# Altium schematic symbol library Ic%.SchLib: 452 symbols (part 9 of 12)
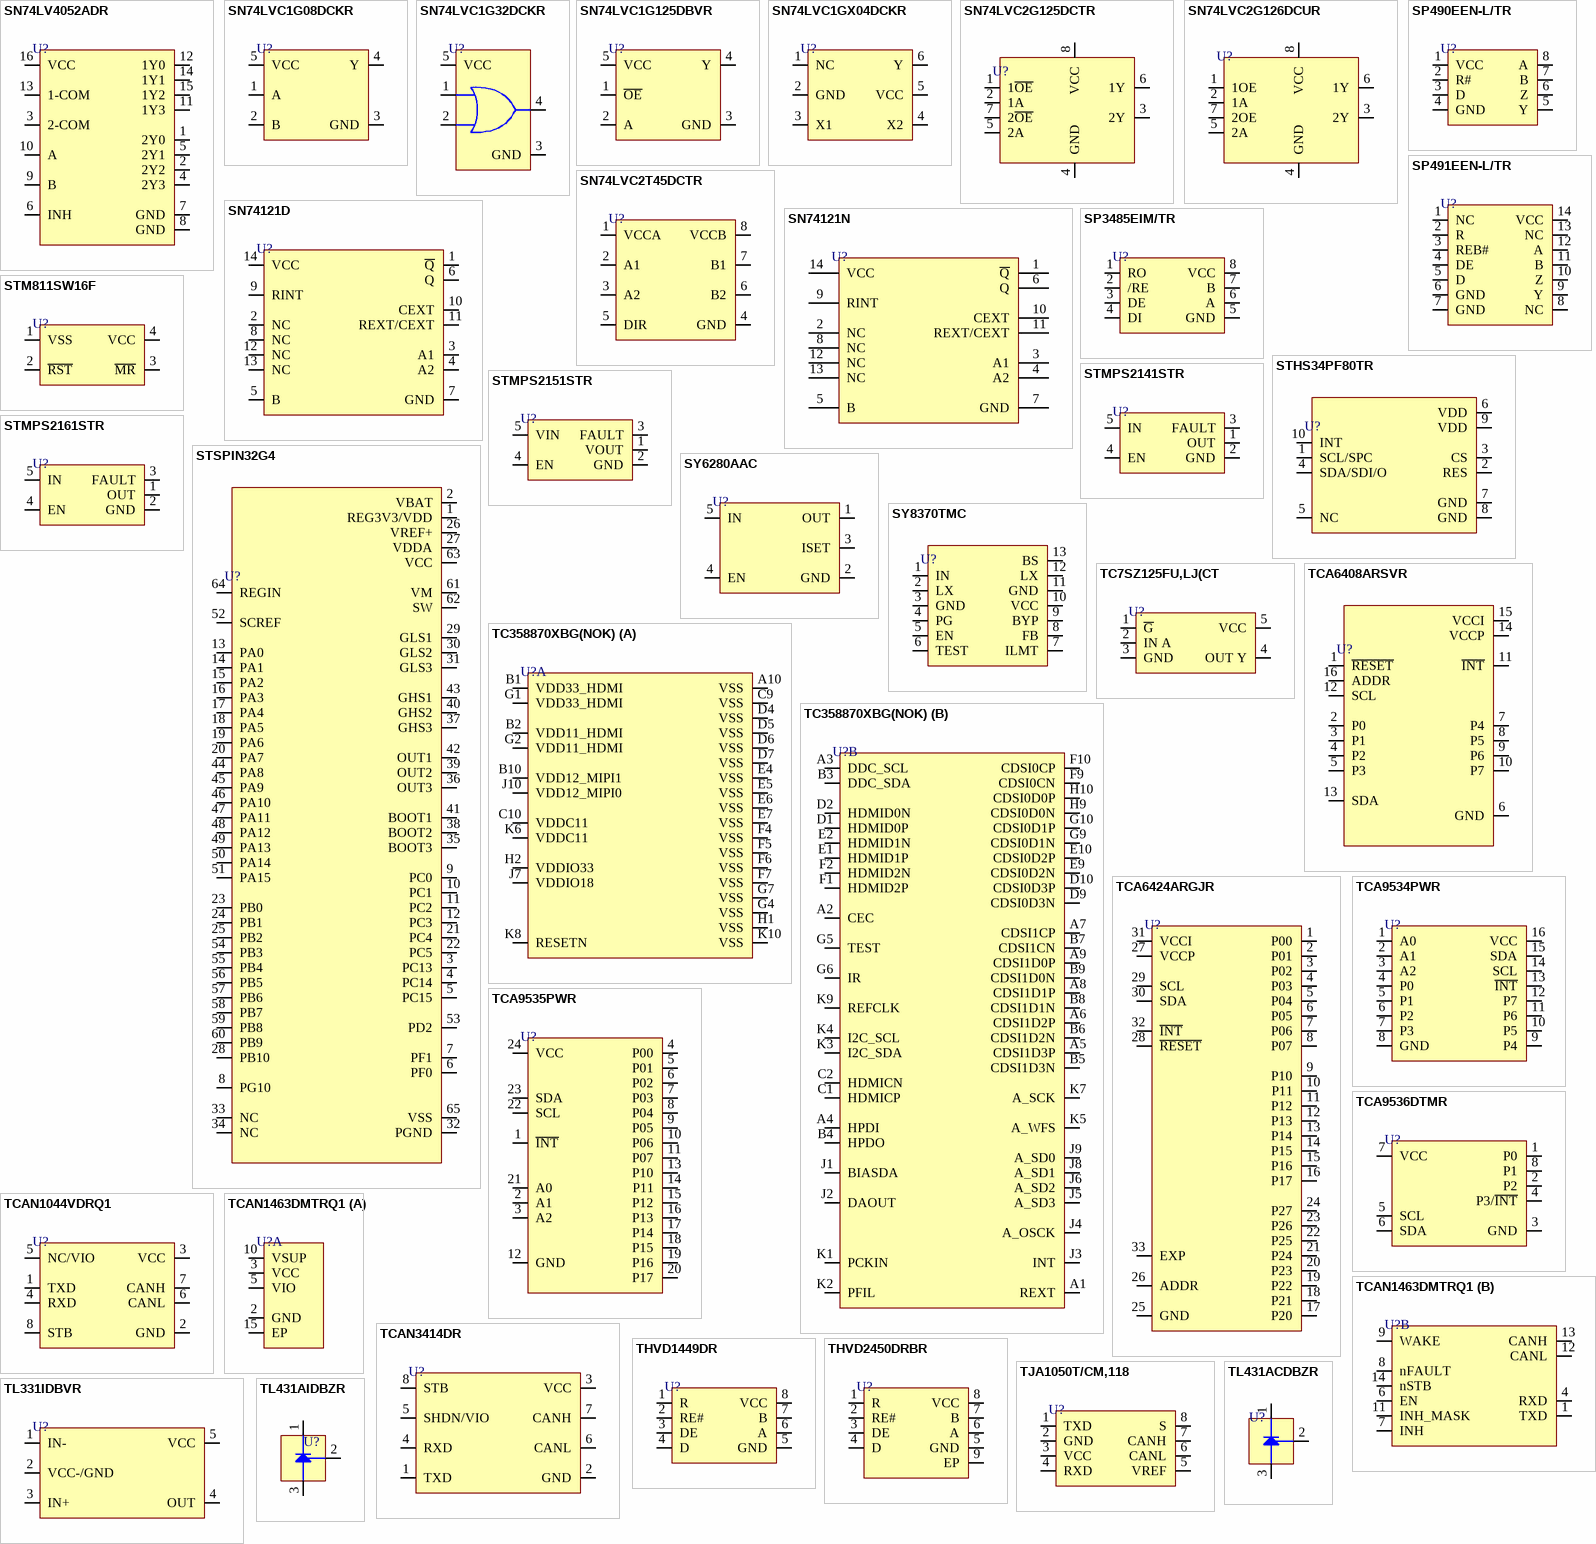
[diagram p31: symbols SN74LV4052ADR to TL431AIDBZR]

## SN74LVC1G32DCKR
designator U?
IC GATE OR 1CH 2-INP SC70-5; Manufacturer: Texas Instruments; Manufacturer Part Number: SN74LVC1G32DCKR; Output Current: 32mA; Propagation Delay: 4ns; Number of Circuits: 1; Number of Inputs: 2; Min Supply Voltage: 1.65V; Max Supply Voltage: 5.5V; Logic Function: OR GATE; Quiescent Current: 10uA; High Level Output Current: -32mA; Turn-On Delay Time: 4.5ns; Number of Channels: 1NUMBER; Supplier: Mouser; LCSC Part Number: C7840; RoHS: Yes; Item Type: IC; Stock: 85906; Pricing: 1=0.1, 10=0.058, 50=0.058, 100=0.042, 1000=0.039, 10000=0.033 (USD); Mounting Technology: Surface Mount; Case/Package: SC; Pins: 5; Weight: 8.8E-05oz; Min Operating Temperature: -40°C; Max Operating Temperature: 125°C; Packaging: Tape and Reel; Number of Gates: 1; Number of Bits: 1; Package Quantity: 1; Number of Elements: 1; Number of Outputs: 1; Low Level Output Current: 32mA; Number of Input Lines: 2; Number of Output Lines: 1; Series: 74LVC; Technology: CMOS; Max Output current: 32mA; Termination: SMD/SMT; Min Supply Voltage (DC): 1.65V; Nominal Supply Current: 10uA; Thickness: 900um; Radiation Hardening: No; Reach SVHC Compliant: No; Lead Free: Lead Free; RoHS Compliant: Yes; ComponentLink1URL: https://datasheet.ciiva.com/6124/1768050-6124560.pdf?src-supplier=Farnell; ComponentLink1Description: https://datasheet.ciiva.com/6124/1768050-6124560.pdf?src-supplier=Farnell; ComponentLink2URL: https://datasheet.ciiva.com/1864/sn74lvc1g32-1864192.pdf?src-supplier=Digikey; ComponentLink2Description: https://datasheet.ciiva.com/1864/sn74lvc1g32-1864192.pdf?src-supplier=Digikey; ComponentLink3URL: https://datasheet.ciiva.com/27049/756781-27049784.pdf?src-supplier=Jameco; ComponentLink3Description: https://datasheet.ciiva.com/27049/756781-27049784.pdf?src-supplier=Jameco; ComponentLink4URL: https://datasheet.ciiva.com/15090/getdatasheetpartid-127914-15090759.pdf?src-supplier=Verical; ComponentLink4Description: https://datasheet.ciiva.com/15090/getdatasheetpartid-127914-15090759.pdf?src-supplier=Verical; ComponentLink5URL: https://datasheet.ciiva.com/7783/1768050-7783469.pdf?src-supplier=Element14; ComponentLink5Description: https://datasheet.ciiva.com/7783/1768050-7783469.pdf?src-supplier=Element14; ComponentLink6URL: https://datasheet.ciiva.com/7783/1768050-7783470.pdf?src-supplier=Element14; ComponentLink6Description: https://datasheet.ciiva.com/7783/1768050-7783470.pdf?src-supplier=Element14; ComponentLink7URL: https://datasheet.ciiva.com/1864/sn74lvc1g32-1864191.pdf?src-supplier=Digikey; ComponentLink7Description: https://datasheet.ciiva.com/1864/sn74lvc1g32-1864191.pdf?src-supplier=Digikey; ComponentLink8URL: https://datasheet.ciiva.com/1864/sn74lvc1g32-1864193.pdf?src-supplier=Digikey; ComponentLink8Description: https://datasheet.ciiva.com/1864/sn74lvc1g32-1864193.pdf?src-supplier=Digikey; ComponentLink9URL: https://datasheet.ciiva.com/14290/sn74lvc1g32-14290781.pdf?src-supplier=Avnet; ComponentLink9Description: https://datasheet.ciiva.com/14290/sn74lvc1g32-14290781.pdf?src-supplier=Avnet
footprint SC70-5
pins: 1 A, 2 B, 3 GND, 4 Y, 5 VCC

## SN74LVC1G125DBVR
designator U?
IC BUFF NON-INVERT 5.5V SOT23-5; Manufacturer: Texas Instruments; Manufacturer Part Number: SN74LVC1G125DBVR; Item Type: Buffers, Drivers and Transceivers; Number of Elements: 1; Logic Function: Buffer,Inverting; High Level Output Current: 32mA; Polarity: Non-Inverting; Output Type: 3-STATE; Min Supply Voltage: 1.65V; Propagation Delay: 4ns; Quiescent Current: 10uA; Supplier 1: Mouser; RoHS: Yes; Stock 1: 237997; Pricing 1: 1=0.36, 10=0.243, 50=0.243, 100=0.102, 1000=0.07, 10000=0.037 (USD); Mount: Surface Mount; Case/Package: SOT-23-5; Weight: 0.001446oz; Min Operating Temperature: -40°C; Max Operating Temperature: 125°C; Packaging: Tape and Reel; Package Quantity: 3000; Number of Bits per Element: 1; Low Level Output Current: 32mA; Number of Gates: 1; Number of Bits: 1; Series: 74LVC; Max Supply Voltage: 5.5V; Number of Channels: 1; Technology: CMOS; Number of Input Lines: 1; Number of Output Lines: 1; Number of Circuits: 1; Max Supply Current: 10uA; Length: 2.9mm; Width: 1.6mm; Height: 1.15mm; Lead Free: Lead Free; RoHS Compliant: Yes; Supplier Part Number 1: 595-SN74LVC1G125DBVR
footprint SOT-23-5
pins: 1 ~{OE}, 2 A, 3 GND, 4 Y, 5 VCC

## SN74LVC1GX04DCKR
designator U?
IC CRYSTAL OSC DRIVER SC70-6; Manufacturer: Texas Instruments; Manufacturer Part Number: SN74LVC1GX04DCKR; Max Supply Voltage: 5.5V; Min Supply Voltage: 1.65V; Number of Bits: 1; Operating Supply Current: 10uA; Propagation Delay: 5ns; Supplier: Mouser; Supplier Part Number: 595-SN74LVC1GX04DCKR; RoHS: Yes; Item Type: IC; Stock: 6262; Pricing: 1=0.78, 10=0.664, 50=0.664, 100=0.526, 1000=0.385, 10000=0.334 (USD); Mounting Technology: Surface Mount; Case/Package: SC; Pins: 6; Weight: 8.8E-05oz; Min Operating Temperature: -40°C; Max Operating Temperature: 125°C; Packaging: Tape and Reel; Package Quantity: 3000; Series: 74LVC; Length: 2mm; Depth: 1.25mm; Radiation Hardening: No; Lead Free: Lead Free; RoHS Compliant: Yes; ComponentLink1URL: https://datasheet.ciiva.com/15116/getdatasheetpartid-252002-15116145.pdf?src-supplier=Verical; ComponentLink1Description: https://datasheet.ciiva.com/15116/getdatasheetpartid-252002-15116145.pdf?src-supplier=Verical; ComponentLink2URL: https://datasheet.ciiva.com/1897/sn74lvc1gx04-1897126.pdf?src-supplier=Digikey; ComponentLink2Description: https://datasheet.ciiva.com/1897/sn74lvc1gx04-1897126.pdf?src-supplier=Digikey; ComponentLink3URL: https://datasheet.ciiva.com/1897/sn74lvc1gx04-1897125.pdf?src-supplier=Digikey; ComponentLink3Description: https://datasheet.ciiva.com/1897/sn74lvc1gx04-1897125.pdf?src-supplier=Digikey; ComponentLink4URL: https://datasheet.ciiva.com/1897/sn74lvc1gx04-1897127.pdf?src-supplier=Digikey; ComponentLink4Description: https://datasheet.ciiva.com/1897/sn74lvc1gx04-1897127.pdf?src-supplier=Digikey; ComponentLink5URL: https://datasheet.ciiva.com/3179/sn74lvc1gx04-3179083.pdf?src-supplier=Avnet; ComponentLink5Description: https://datasheet.ciiva.com/3179/sn74lvc1gx04-3179083.pdf?src-supplier=Avnet; ComponentLink6URL: https://datasheet.ciiva.com/3177/sn74lvc1gx04-3177448.pdf?src-supplier=Avnet; ComponentLink6Description: https://datasheet.ciiva.com/3177/sn74lvc1gx04-3177448.pdf?src-supplier=Avnet; LCSC Part Number: C2649416
footprint SC-70-6
pins: 1 NC, 2 GND, 3 X1, 4 X2, 5 VCC, 6 Y

## SN74LVC2G125DCTR
designator U?
IC BUFFER NON-INVERT 5.5V SM8; Manufacturer: Texas Instruments; Manufacturer Part Number: SN74LVC2G125DCTR; Nominal Supply Current: 10uA; Number of Circuits: 1NUMBER; Supplier 1: Mouser; RoHS: Yes; Item Type: IC; Stock 1: 14743; Pricing 1: 1=0.52, 10=0.427, 50=0.427, 100=0.316, 1000=0.241, 10000=0.19 (USD); Thickness: 1.29mm; ComponentLink1URL: https://datasheet.ciiva.com/7744/1781747-7744021.pdf?src-supplier=Element14; ComponentLink1Description: https://datasheet.ciiva.com/7744/1781747-7744021.pdf?src-supplier=Element14; ComponentLink2URL: https://datasheet.ciiva.com/7744/1781747-7744022.pdf?src-supplier=Element14; ComponentLink2Description: https://datasheet.ciiva.com/7744/1781747-7744022.pdf?src-supplier=Element14; Supplier Part Number 1: 595-SN74LVC2G125DCTR; LCSC Part Number: C206035
footprint SM8
pins: 1 1~{OE}, 2 1A, 3 2Y, 4 GND, 5 2A, 6 1Y, 7 2~{OE}, 8 VCC

## SN74LVC2G126DCUR
designator U?
Low-Noise, 8-Channel, 24-Bit Analog-to-Digital Converter for Biopotential Measurements 64-TQFP -40 to 85; Manufacturer: Texas Instruments; Manufacturer Part Number: SN74LVC2G126DCUR; Item Type: IC; Power Consumption: 41mW; Supplier: Mouser; Supplier Part Number: 595-SN74LVC2G126DCUR; RoHS: Yes; Category: Buffers, Drivers and Transceivers; Stock: 11510; Pricing: 1=0.51, 10=0.406, 50=0.406, 100=0.3, 1000=0.19, 10000=0.151 (USD); ComponentLink1URL: https://datasheet.ciiva.com/15094/getdatasheetpartid-92138-15094658.pdf?src-supplier=Verical; ComponentLink1Description: https://datasheet.ciiva.com/15094/getdatasheetpartid-92138-15094658.pdf?src-supplier=Verical; ComponentLink2URL: https://datasheet.ciiva.com/1833/sn74lvc2g126-1833920.pdf?src-supplier=Digi-Key; ComponentLink2Description: https://datasheet.ciiva.com/1833/sn74lvc2g126-1833920.pdf?src-supplier=Digi-Key; ComponentLink3URL: https://datasheet.ciiva.com/1833/sn74lvc2g126-1833919.pdf?src-supplier=Digi-Key; ComponentLink3Description: https://datasheet.ciiva.com/1833/sn74lvc2g126-1833919.pdf?src-supplier=Digi-Key; ComponentLink4URL: https://datasheet.ciiva.com/1833/sn74lvc2g126-1833921.pdf?src-supplier=Digi-Key; ComponentLink4Description: https://datasheet.ciiva.com/1833/sn74lvc2g126-1833921.pdf?src-supplier=Digi-Key; ComponentLink5URL: https://datasheet.ciiva.com/7744/1633768-7744173.pdf?src-supplier=Element14; ComponentLink5Description: https://datasheet.ciiva.com/7744/1633768-7744173.pdf?src-supplier=Element14; ComponentLink6URL: https://datasheet.ciiva.com/46386/1882504-46386027.pdf?src-supplier=Element14; ComponentLink6Description: https://datasheet.ciiva.com/46386/1882504-46386027.pdf?src-supplier=Element14; ComponentLink7URL: https://datasheet.ciiva.com/46439/1847403-46439626.pdf?src-supplier=Element14; ComponentLink7Description: https://datasheet.ciiva.com/46439/1847403-46439626.pdf?src-supplier=Element14; LCSC Part Number: C2652104; Length: 10mm; Width: 10mm; Height: 1.2mm; Thickness: 1mm; Lead Free: 5697LeadFree; ComponentLink8URL: https://datasheet.ciiva.com/13063/ads1299-224171-13063283.pdf?src-supplier=Mouser; ComponentLink8Description: https://datasheet.ciiva.com/13063/ads1299-224171-13063283.pdf?src-supplier=Mouser; ComponentLink9URL: https://datasheet.ciiva.com/26913/getdatasheetpartid-563195-26913237.pdf?src-supplier=Verical; ComponentLink9Description: https://datasheet.ciiva.com/26913/getdatasheetpartid-563195-26913237.pdf?src-supplier=Verical; ComponentLink10URL: https://datasheet.ciiva.com/6668/ads1299-6668469.pdf?src-supplier=Digikey; ComponentLink10Description: https://datasheet.ciiva.com/6668/ads1299-6668469.pdf?src-supplier=Digikey
footprint VSSOP-8 (0.5mm Pitch) (3.1x2.1)
pins: 1 1OE, 2 1A, 3 2Y, 4 GND, 5 2A, 6 1Y, 7 2OE, 8 VCC

## SN74LVC2T45DCTR
designator U?
IC TRANSLATOR BIDIRECTIONAL SM8; Manufacturer: Texas Instruments; Manufacturer Part Number: SN74LVC2T45DCTR; Supplier: Mouser; LCSC Part Number: C22672; RoHS: Yes; Item Type: IC; Stock: 182025; Pricing: 1=0.83, 10=0.709, 50=0.709, 100=0.567, 1000=0.413, 10000=0.334 (USD); ComponentLink1URL: https://datasheet.ciiva.com/15086/getdatasheetpartid-190128-15086325.pdf?src-supplier=Verical; ComponentLink1Description: https://datasheet.ciiva.com/15086/getdatasheetpartid-190128-15086325.pdf?src-supplier=Verical; ComponentLink2URL: https://datasheet.ciiva.com/1899/sn74lvc2t45-1899281.pdf?src-supplier=Digikey; ComponentLink2Description: https://datasheet.ciiva.com/1899/sn74lvc2t45-1899281.pdf?src-supplier=Digikey; ComponentLink3URL: https://datasheet.ciiva.com/34301/1046748-34301921.pdf?src-supplier=Jameco; ComponentLink3Description: https://datasheet.ciiva.com/34301/1046748-34301921.pdf?src-supplier=Jameco; ComponentLink4URL: https://datasheet.ciiva.com/1628/1862500-1628670.pdf?src-supplier=Newark; ComponentLink4Description: https://datasheet.ciiva.com/1628/1862500-1628670.pdf?src-supplier=Newark; ComponentLink5URL: https://datasheet.ciiva.com/46395/1882347-46395882.pdf?src-supplier=Element14; ComponentLink5Description: https://datasheet.ciiva.com/46395/1882347-46395882.pdf?src-supplier=Element14; ComponentLink6URL: https://datasheet.ciiva.com/22653/sn74lvc2t45-22653414.pdf?src-supplier=Farnell; ComponentLink6Description: https://datasheet.ciiva.com/22653/sn74lvc2t45-22653414.pdf?src-supplier=Farnell; ComponentLink7URL: https://datasheet.ciiva.com/14300/sn74lvc2t45-14300710.pdf?src-supplier=Avnet; ComponentLink7Description: https://datasheet.ciiva.com/14300/sn74lvc2t45-14300710.pdf?src-supplier=Avnet; ComponentLink8URL: https://datasheet.ciiva.com/14300/sn74lvc2t45-14300711.pdf?src-supplier=Avnet; ComponentLink8Description: https://datasheet.ciiva.com/14300/sn74lvc2t45-14300711.pdf?src-supplier=Avnet; ComponentLink9URL: https://datasheet.ciiva.com/1899/sn74lvc2t45-1899282.pdf?src-supplier=Digikey; ComponentLink9Description: https://datasheet.ciiva.com/1899/sn74lvc2t45-1899282.pdf?src-supplier=Digikey; ComponentLink10URL: https://datasheet.ciiva.com/1899/sn74lvc2t45-1899283.pdf?src-supplier=Digikey; ComponentLink10Description: https://datasheet.ciiva.com/1899/sn74lvc2t45-1899283.pdf?src-supplier=Digikey; ComponentLink11URL: https://datasheet.ciiva.com/1508/1863620-1508814.pdf?src-supplier=Element14; ComponentLink11Description: https://datasheet.ciiva.com/1508/1863620-1508814.pdf?src-supplier=Element14
footprint MSOP-8
pins: 1 VCCA, 2 A1, 3 A2, 4 GND, 5 DIR, 6 B2, 7 B1, 8 VCCB

## SN74121D
designator U?
45ns 4.75V~5.25V SOIC-14 Monostable Multivibrators ROHS; Manufacturer: Taxes Instrument; Manufacturer Part Number: SN74121D; Item Type: IC; Package: SOIC-14; LCSC Part Number: C1522774; ComponentLink1Description: LCSC; ComponentLink1URL: https://www.lcsc.com/product-detail/Monostable-Multivibrators_Texas-Instruments-SN74121D_C1522774.html
footprint SOIC-14
pins: 1 ~{Q}, 2 NC, 3 A1, 4 A2, 5 B, 6 Q, 7 GND, 8 NC, 9 RINT, 10 CEXT, 11 REXT/CEXT, 12 NC, 13 NC, 14 VCC

## SN74121N
designator U?
45ns 4.75V~5.25V DIP-14 Monostable Multivibrators ROHS; Manufacturer: Texas Instruments; Manufacturer Part Number: SN74121N; Item Type: IC; Package: DIP-14; LCSC Part Number: C354141; ComponentLink1Description: LCSC; ComponentLink1URL: https://www.lcsc.com/product-detail/Monostable-Multivibrators_Texas-Instruments-SN74121N_C354141.html
footprint DIP-14
pins: 1 ~{Q}, 2 NC, 3 A1, 4 A2, 5 B, 6 Q, 7 GND, 8 NC, 9 RINT, 10 CEXT, 11 REXT/CEXT, 12 NC, 13 NC, 14 VCC

## SP490EEN-L/TR
designator U?
IC TRANSCEIVER FULL 1/1 8SOIC; Manufacturer: MaxLinear; Manufacturer Part Number: SP490EEN-L/TR; Supplier: Digikey; LCSC Part Number: C19128; RoHS: Yes; Item Type: IC; Stock: 3412; Pricing: 1=1.82, 10=1.288, 25=1.1548, 100=1.0088, 250=0.93916, 500=0.89714, 1000=0.86255 (USD); ComponentLink1URL: https://www.maxlinear.com/document?id=747&src-supplier=Digikey; ComponentLink1Description: https://www.maxlinear.com/document?id=747&src-supplier=Digikey; ComponentLink2URL: https://datasheet.octopart.com/SP490EEN-L-TR-MaxLinear-datasheet-104600443.pdf?src-supplier=LKR; ComponentLink2Description: https://datasheet.octopart.com/SP490EEN-L-TR-MaxLinear-datasheet-104600443.pdf?src-supplier=LKR
footprint SOIC-8(0.154", 3.90mm Width)
pins: 1 VCC, 2 R#, 3 D, 4 GND, 5 Y, 6 Z, 7 B, 8 A

## SP491EEN-L/TR
designator U?
IC TRANSCEIVER FULL 1/1 14SOIC; Manufacturer: MaxLinear; Manufacturer Part Number: SP491EEN-L/TR; Supplier: Digikey; LCSC Part Number: C32476; RoHS: Yes; Item Type: IC; Stock: 20733; Pricing: 1=1.82, 10=1.288, 25=1.1548, 100=1.0088, 250=0.93916, 500=0.89714, 1000=0.86255 (USD); ComponentLink1URL: https://www.maxlinear.com/document?id=747&src-supplier=Digikey; ComponentLink1Description: https://www.maxlinear.com/document?id=747&src-supplier=Digikey; ComponentLink2URL: https://datasheet.octopart.com/SP491EEN-L-TR-MaxLinear-datasheet-104600443.pdf?src-supplier=LKR; ComponentLink2Description: https://datasheet.octopart.com/SP491EEN-L-TR-MaxLinear-datasheet-104600443.pdf?src-supplier=LKR
footprint SOIC-14
pins: 1 NC, 2 R, 3 REB#, 4 DE, 5 D, 6 GND, 7 GND, 8 NC, 9 Y, 10 Z, 11 B, 12 A, 13 NC, 14 VCC

## SP3485EIM/TR
designator U?
SOP-8 RS-485/RS-422 ICs ROHS; Manufacturer: HGSEMI; Manufacturer Part Number: SP3485EIM/TR; Item Type: IC; Package: SOP-8; LCSC Part Number: C519086; ComponentLink1Description: LCSC; ComponentLink1URL: https://www.lcsc.com/product-detail/RS-485-RS-422-ICs_HGSEMI-SP3485EIM-TR_C519086.html
footprint SOP-8
pins: 1 RO, 2 /RE, 3 DE, 4 DI, 5 GND, 6 A, 7 B, 8 VCC

## STHS34PF80TR
designator U?
SENSOR OPT 5000-20000NM 10OLGA; Manufacturer: STMicroelectronics; Manufacturer Part Number: STHS34PF80TR; Item Type: IC; Supplier: Arrow Electronics; Supplier Part Number: STHS34PF80TR; RoHS: No; Stock: 49500; Pricing: 4500=3.223 (USD)
footprint 10-OLGA (3.2x4.2)
pins: 1 SCL/SPC, 2 RES, 3 CS, 4 SDA/SDI/O, 5 NC, 6 VDD, 7 GND, 8 GND, 9 VDD, 10 INT

## STM811SW16F
designator U?
IC SUPERVISOR 1 CHANNEL SOT143-4; Manufacturer: STMicroelectronics; Manufacturer Part Number: STM811SW16F; Supplier: Mouser; Supplier Part Number: 511-STM811SW16F; RoHS: Yes; Item Type: IC; Stock: 20552; Pricing: 1=0.59, 10=0.546, 50=0.528, 100=0.468, 1000=0.37, 10000=0.335 (USD); ComponentLink1URL: https://datasheet.ciiva.com/15105/getdatasheetpartid-93222-15105852.pdf?src-supplier=Verical; ComponentLink1Description: https://datasheet.ciiva.com/15105/getdatasheetpartid-93222-15105852.pdf?src-supplier=Verical; ComponentLink2URL: https://datasheet.ciiva.com/1970/cd00003591-1970356.pdf?src-supplier=Digikey; ComponentLink2Description: https://datasheet.ciiva.com/1970/cd00003591-1970356.pdf?src-supplier=Digikey; ComponentLink3URL: https://datasheet.ciiva.com/1970/cd00003591-1970357.pdf?src-supplier=Digikey; ComponentLink3Description: https://datasheet.ciiva.com/1970/cd00003591-1970357.pdf?src-supplier=Digikey; ComponentLink4URL: https://datasheet.ciiva.com/1970/cd00003591-1970358.pdf?src-supplier=Digikey; ComponentLink4Description: https://datasheet.ciiva.com/1970/cd00003591-1970358.pdf?src-supplier=Digikey; ComponentLink5URL: https://datasheet.ciiva.com/22710/1690194-22710283.pdf?src-supplier=Element14; ComponentLink5Description: https://datasheet.ciiva.com/22710/1690194-22710283.pdf?src-supplier=Element14; LCSC Part Number: C124715
footprint SOT-143-4_
pins: 1 VSS, 2 ~{RST}, 3 ~{MR}, 4 VCC

## STMPS2141STR
designator U?
IC PWR SWITCH N-CHAN 1:1 SOT23-5; Manufacturer: STMicroelectronics; Manufacturer Part Number: STMPS2141STR; Drain to Source Resistance: 90mR; Max Supply Voltage: 5.5V; Min Supply Voltage: 2.7V; Nominal Supply Voltage: 5V; Number of Channels: 1NUMBER; Value: 120mR; Supplier: Future Electronics; LCSC Part Number: C54624; RoHS: Yes; Item Type: IC; Stock: 102000; Pricing: 3000=0.167, 9000=0.162, 12000=0.161, 30000=0.157, 45000=0.153 (USD); Output Voltage: 5V; ComponentLink1URL: https://datasheet.ciiva.com/15108/getdatasheetpartid-160072-15108990.pdf?src-supplier=Verical; ComponentLink1Description: https://datasheet.ciiva.com/15108/getdatasheetpartid-160072-15108990.pdf?src-supplier=Verical; ComponentLink2URL: https://datasheet.ciiva.com/4923/cd00167470-4923447.pdf?src-supplier=Mouser; ComponentLink2Description: https://datasheet.ciiva.com/4923/cd00167470-4923447.pdf?src-supplier=Mouser; ComponentLink3URL: https://datasheet.ciiva.com/1962/cd00167470-1962472.pdf?src-supplier=Digikey; ComponentLink3Description: https://datasheet.ciiva.com/1962/cd00167470-1962472.pdf?src-supplier=Digikey; ComponentLink4URL: https://datasheet.ciiva.com/1962/cd00167470-1962473.pdf?src-supplier=Digikey; ComponentLink4Description: https://datasheet.ciiva.com/1962/cd00167470-1962473.pdf?src-supplier=Digikey; ComponentLink5URL: https://datasheet.ciiva.com/1962/cd00167470-1962474.pdf?src-supplier=Digikey; ComponentLink5Description: https://datasheet.ciiva.com/1962/cd00167470-1962474.pdf?src-supplier=Digikey; ComponentLink6URL: https://datasheet.ciiva.com/16491/cd00167470-16491245.pdf?src-supplier=Future+Electronics; ComponentLink6Description: https://datasheet.ciiva.com/16491/cd00167470-16491245.pdf?src-supplier=Future+Electronics
footprint SOT-23-5
pins: 1 OUT, 2 GND, 3 FAULT, 4 EN, 5 IN

## STMPS2151STR
designator U?
IC PWR SWITCH N-CHAN 1:1 SOT23-5; Manufacturer: STMicroelectronics; Manufacturer Part Number: STMPS2151STR; Current: 500mA; Drain to Source Resistance: 90mΩ; Fault Protection: Over Temperature, Reverse Current; Interface: On/Off; Max Supply Voltage: 5.5V; Max Junction Temperature (Tj): 125°C; Max Power Dissipation: 33.8mW; Max Supply Current: 40µA; Min Input Voltage: 2.7V; Nominal Supply Voltage: 5V; Nominal Supply Current: 12µA; Number of Channels: 1; Output Configuration: High Side; Power Dissipation: 32.5mW; Value: 90mΩ; Turn-Off Delay Time: 10ms; Turn-On Delay Time: 5ms; Supplier: Arrow Electronics; LCSC Part Number: C135998; RoHS: Compliant; Item Type: IC; Stock: 6000; Pricing: 3000=0.4293, 6000=0.391 (USD); Ambient Temperature Range High: 85°C; Case/Package: SOT-23; China RoHS: Compliant; Current Rating: 500mA; Height: 1.45mm; Height - Seated (Max): 1.45mm; Lead Free: Lead Free; Length: 2.9mm; Lifecycle Status: Production; Max Operating Temperature: 85°C; Max Output current: 500mA; Min Operating Temperature: -40°C; Min Supply Voltage: 2.7V; Mounting Technology: Surface Mount; Number of Circuits: 1; Number of Inputs: 1; Number of Outputs: 1; Pins: 5; Number of Terminals: 5; On-State Resistance: 90mΩ; Operating Supply Voltage: 5V; Output Current: 500mA; Output Voltage: 5V; Radiation Hardening: No; REACH SVHC: Yes; Schedule B: 8542390000; Terminal Pitch: 950µm; Voltage: 5.5V; Width: 1.625mm; ComponentLink1URL: https://datasheet.octopart.com:443/STMPS2151STR-STMicroelectronics-datasheet-15207125.pdf?src-supplier=ODG+(Origin+Data+Global); ComponentLink1Description: https://datasheet.octopart.com:443/STMPS2151STR-STMicroelectronics-datasheet-15207125.pdf?src-supplier=ODG+(Origin+Data+Global); ComponentLink2URL: https://datasheet.octopart.com:443/STMPS2151STR-STMicroelectronics-datasheet-8090930.pdf?src-supplier=Factory+Futures; ComponentLink2Description: https://datasheet.octopart.com:443/STMPS2151STR-STMicroelectronics-datasheet-8090930.pdf?src-supplier=Factory+Futures; ComponentLink3URL: https://datasheet.octopart.com:443/STMPS2151STR-STMicroelectronics-datasheet-12510524.pdf?src-supplier=Factory+Futures; ComponentLink3Description: https://datasheet.octopart.com:443/STMPS2151STR-STMicroelectronics-datasheet-12510524.pdf?src-supplier=Factory+Futures; ComponentLink4URL: https://datasheet.octopart.com:443/STMPS2151STR-STMicroelectronics-datasheet-502421.pdf?src-supplier=Future+Electronics; ComponentLink4Description: https://datasheet.octopart.com:443/STMPS2151STR-STMicroelectronics-datasheet-502421.pdf?src-supplier=Future+Electronics
footprint SOT-23-5
pins: 1 VOUT, 2 GND, 3 FAULT, 4 EN, 5 VIN

## STMPS2161STR
designator U?
IC PWR SWITCH N-CHAN 1:1 SOT23-5; Manufacturer: STMicroelectronics; Manufacturer Part Number: STMPS2161STR; Drain to Source Resistance: 90mR; Max Supply Voltage: 5.5V; Min Supply Voltage: 2.7V; Nominal Supply Voltage: 5V; Number of Channels: 1NUMBER; Supplier: Future Electronics; LCSC Part Number: C361034; RoHS: Yes; Item Type: IC; Stock: 3000; Pricing: 3000=0.42, 6000=0.41, 9000=0.405, 12000=0.405, 15000=0.395 (USD); Output Voltage: 5V; Height: 1.45mm; ComponentLink1URL: https://datasheet.ciiva.com/4923/cd00167470-116695-4923505.pdf?src-supplier=Mouser; ComponentLink1Description: https://datasheet.ciiva.com/4923/cd00167470-116695-4923505.pdf?src-supplier=Mouser; ComponentLink2URL: https://datasheet.ciiva.com/15108/getdatasheetpartid-66027-15108935.pdf?src-supplier=Verical; ComponentLink2Description: https://datasheet.ciiva.com/15108/getdatasheetpartid-66027-15108935.pdf?src-supplier=Verical; ComponentLink3URL: https://datasheet.ciiva.com/1962/cd00167470-1962487.pdf?src-supplier=Digikey; ComponentLink3Description: https://datasheet.ciiva.com/1962/cd00167470-1962487.pdf?src-supplier=Digikey; ComponentLink4URL: https://datasheet.ciiva.com/1962/cd00167470-1962488.pdf?src-supplier=Digikey; ComponentLink4Description: https://datasheet.ciiva.com/1962/cd00167470-1962488.pdf?src-supplier=Digikey; ComponentLink5URL: https://datasheet.ciiva.com/1962/cd00167470-1962489.pdf?src-supplier=Digikey; ComponentLink5Description: https://datasheet.ciiva.com/1962/cd00167470-1962489.pdf?src-supplier=Digikey; ComponentLink6URL: https://datasheet.ciiva.com/1512/1700527-1512630.pdf?src-supplier=Element14; ComponentLink6Description: https://datasheet.ciiva.com/1512/1700527-1512630.pdf?src-supplier=Element14; ComponentLink7URL: https://datasheet.ciiva.com/16491/cd00167470-16491224.pdf?src-supplier=Future+Electronics; ComponentLink7Description: https://datasheet.ciiva.com/16491/cd00167470-16491224.pdf?src-supplier=Future+Electronics; ComponentLink8URL: https://datasheet.ciiva.com/41457/001185713-da-01-en-ic-pwr-switch-stmps2161str-sot-23-5-stm-41457482.pdf?src-supplier=Conrad; ComponentLink8Description: https://datasheet.ciiva.com/41457/001185713-da-01-en-ic-pwr-switch-stmps2161str-sot-23-5-stm-41457482.pdf?src-supplier=Conrad
footprint SOT-23-5
pins: 1 OUT, 2 GND, 3 FAULT, 4 EN, 5 IN

## STSPIN32G4
designator U?
3-PHASE BRUSHLESS MOTOR CONTROLL; Manufacturer: STMicroelectronics; Manufacturer Part Number: STSPIN32G4; Item Type: IC; Supplier: Mouser; LCSC Part Number: C7434864; RoHS: Yes; Stock: 5173; Pricing: 1=7.19, 10=5.61, 50=4.81, 100=4.81, 1000=4.37, 10000=4.37 (USD)
footprint 64-VFQFPN 9X9
pins: 1 REG3V3/VDD, 2 VBAT, 3 PC13, 4 PC14, 5 PC15, 6 PF0, 7 PF1, 8 PG10, 9 PC0, 10 PC1, 11 PC2, 12 PC3, 13 PA0, 14 PA1, 15 PA2, 16 PA3, 17 PA4, 18 PA5, 19 PA6, 20 PA7, 21 PC4, 22 PC5, 23 PB0, 24 PB1, 25 PB2, 26 VREF+, 27 VDDA, 28 PB10, 29 GLS1, 30 GLS2, 31 GLS3, 32 PGND, 33 NC, 34 NC, 35 BOOT3, 36 OUT3, 37 GHS3, 38 BOOT2, 39 OUT2, 40 GHS2, 41 BOOT1, 42 OUT1, 43 GHS1, 44 PA8, 45 PA9, 46 PA10, 47 PA11, 48 PA12, 49 PA13, 50 PA14, 51 PA15, 52 SCREF, 53 PD2, 54 PB3, 55 PB4, 56 PB5, 57 PB6, 58 PB7, 59 PB8, 60 PB9, 61 VM, 62 SW, 63 VCC, 64 REGIN, 65 VSS

## SY6280AAC
designator U?
SOT-23-5 Power Distribution Switches ROHS; Manufacturer: Silergy; Manufacturer Part Number: SY6280AAC; Item Type: IC; Supplier: Avnet; Supplier Part Number: SY6280AAC; RoHS: No; Category: USB Interface ICs; Stock: 3000; LCSC Part Number: C55136
footprint SOT-23-5
pins: 1 OUT, 2 GND, 3 ISET, 4 EN, 5 IN

## SY8370TMC
designator U?
Step-down type Adjustable 1.2V 4V~24V 11A QFN-13(3x4) DC-DC Converters ROHS; Manufacturer: Silergy Corp; Manufacturer Part Number: SY8370TMC; Item Type: IC; Package: QFN-13(3x4); LCSC Part Number: C3029744; ComponentLink1Description: LCSC; ComponentLink1URL: https://www.lcsc.com/product-detail/DC-DC-Converters_Silergy-Corp-SY8370TMC_C3029744.html
footprint QFN-13(3x4)
pins: 1 IN, 2 LX, 3 GND, 4 PG, 5 EN, 6 TEST, 7 ILMT, 8 FB, 9 BYP, 10 VCC, 11 GND, 12 LX, 13 BS

## TC7SZ125FU,LJ(CT
designator U?
IC BUFFER NON-INVERT 5.5V USV; Manufacturer: Toshiba; Manufacturer Part Number: TC7SZ125FU,LJ(CT; Min Supply Voltage: 1.8V; Number of Elements: 1; Logic Function: Buffer,Inverting; High Level Output Current: 32mA; Operating Supply Current: 20uA; Max Power Dissipation: 200mW; Polarity: Non-Inverting; Output Type: 3-STATE; Supplier: Rs; Supplier Part Number: 8966769; RoHS: No; Category: Buffers, Drivers and Transceivers; Stock: 800; Pricing: 100=0.12, 300=0.097, 600=0.094, 1200=0.091, 3000=0.089 (GBP); Mounting Technology: Surface Mount; Case/Package: SSOP; Min Operating Temperature: -40°C; Max Operating Temperature: 85°C; Packaging: Tape and Reel; Package Quantity: 1; Max Supply Voltage: 5.5V; Series: TC7SZ; Number of Bits per Element: 1; Low Level Output Current: 32mA; RoHS Compliant: No; ComponentLink1URL: https://datasheet.ciiva.com/48465/tc7sz125fu-datasheet-en-20150723-48465175.pdf?src-supplier=Avnet; ComponentLink1Description: https://datasheet.ciiva.com/48465/tc7sz125fu-datasheet-en-20150723-48465175.pdf?src-supplier=Avnet; ComponentLink2URL: https://datasheet.ciiva.com/46637/dst-tc7sz125f-tde-en-7291-46637000.pdf?src-supplier=Digi-Key; ComponentLink2Description: https://datasheet.ciiva.com/46637/dst-tc7sz125f-tde-en-7291-46637000.pdf?src-supplier=Digi-Key; ComponentLink3URL: https://datasheet.ciiva.com/46637/dst-tc7sz125f-tde-en-7291-46637001.pdf?src-supplier=Digi-Key; ComponentLink3Description: https://datasheet.ciiva.com/46637/dst-tc7sz125f-tde-en-7291-46637001.pdf?src-supplier=Digi-Key; ComponentLink4URL: https://datasheet.ciiva.com/46636/dst-tc7sz125f-tde-en-7291-46636999.pdf?src-supplier=Digi-Key; ComponentLink4Description: https://datasheet.ciiva.com/46636/dst-tc7sz125f-tde-en-7291-46636999.pdf?src-supplier=Digi-Key
footprint SOT-323-5
pins: 1 ~{G}, 2 IN A, 3 GND, 4 OUT Y, 5 VCC

## TC358870XBG(NOK)
designator U?
Ultra HD to Display Serial Interface Converter 80-Pin VFBGA; Manufacturer: Toshiba; Manufaure Part Number: TC358870XBG(NOK); Item Type: IC; LCSC Part Number: C3008712; ComponentLink1Description: LCSC; Supplier: Mouser; Supplier Part Number: 757-TC358870XBG(NOK); Manufacturer Part Number: TC358870XBG(NOK); RoHS: Yes; Stock: 662; Pricing: 1=10.6, 10=9.75, 50=9.35, 100=8.24, 1000=7.32, 10000=6.71 (USD); Case/Package: VFBGA; Min Operating Temperature: -30°C; Max Operating Temperature: 70°C; ComponentLink2URL: http://toshiba.semicon-storage.com/info/docget.jsp?did=28743&prodName=TC358870XBG&src-supplier=Avnet; ComponentLink2Description: http://toshiba.semicon-storage.com/info/docget.jsp?did=28743&prodName=TC358870XBG&src-supplier=Avnet
footprint TC358870XBG
part A pins: A10 VSS, B1 VDD33_HDMI, B2 VDD11_HDMI, B10 VDD12_MIPI1, C9 VSS, C10 VDDC11, D4 VSS, D5 VSS, D6 VSS, D7 VSS, E4 VSS, E5 VSS, E6 VSS, E7 VSS, F4 VSS, F5 VSS, F6 VSS, F7 VSS, G1 VDD33_HDMI, G2 VDD11_HDMI, G4 VSS, G7 VSS, H1 VSS, H2 VDDIO33, J7 VDDIO18, J10 VDD12_MIPI0, K6 VDDC11, K8 RESETN, K10 VSS
part B pins: A1 REXT, A2 CEC, A3 DDC_SCL, A4 HPDI, A5 CDSI1D3P, A6 CDSI1D2P, A7 CDSI1CP, A8 CDSI1D1P, A9 CDSI1D0P, B3 DDC_SDA, B4 HPDO, B5 CDSI1D3N, B6 CDSI1D2N, B7 CDSI1CN, B8 CDSI1D1N, B9 CDSI1D0N, C1 HDMICP, C2 HDMICN, D1 HDMID0P, D2 HDMID0N, D9 CDSI0D3N, D10 CDSI0D3P, E1 HDMID1P, E2 HDMID1N, E9 CDSI0D2N, E10 CDSI0D2P, F1 HDMID2P, F2 HDMID2N, F9 CDSI0CN, F10 CDSI0CP, G5 TEST, G6 IR, G9 CDSI0D1N, G10 CDSI0D1P, H9 CDSI0D0N, H10 CDSI0D0P, J1 BIASDA, J2 DAOUT, J3 INT, J4 A_OSCK, J5 A_SD3, J6 A_SD2, J8 A_SD1, J9 A_SD0, K1 PCKIN, K2 PFIL, K3 I2C_SDA, K4 I2C_SCL, K5 A_WFS, K7 A_SCK, K9 REFCLK

## TCA6408ARSVR
designator U?
IC XPNDR 400KHZ I2C SMBUS 16UQFN; Manufacturer: Texas Instruments; Manufacturer Part Number: TCA6408ARSVR; Number of Outputs: 8; Max Supply Voltage: 5.5V; Min Supply Voltage: 1.65V; Output Type: PUSH-PULL; Supplier: Mouser; LCSC Part Number: C2649390; RoHS: Yes; Item Type: IC; Stock: 4894; Pricing: 1=0.65, 10=0.463, 50=0.414, 100=0.362, 1000=0.305, 10000=0.275 (USD); Case/Package: QFN; Pins: 16; Min Operating Temperature: -40°C; Max Operating Temperature: 85°C; Packaging: Tape and Reel; Package Quantity: 3000; Number of I/Os: 8; Frequency: 400kHz; Clock Frequency: 400kHz; Series: -; Length: 2.6mm; Width: 1.8mm; Height: 550um; Thickness: 500um; Radiation Hardening: No; Reach SVHC Compliant: No; Lead Free: Lead Free; RoHS Compliant: Yes; ComponentLink1URL: https://datasheet.ciiva.com/4826/scps192c-115421-4826631.pdf?src-supplier=Mouser; ComponentLink1Description: https://datasheet.ciiva.com/4826/scps192c-115421-4826631.pdf?src-supplier=Mouser; ComponentLink2URL: https://datasheet.ciiva.com/15134/getdatasheetpartid-186210-15134440.pdf?src-supplier=Verical; ComponentLink2Description: https://datasheet.ciiva.com/15134/getdatasheetpartid-186210-15134440.pdf?src-supplier=Verical; ComponentLink3URL: https://datasheet.ciiva.com/41460/001187859-da-01-en-ic-i-o-expander-tca6408arsvr-qfn-16-tid-41460599.pdf?src-supplier=Conrad; ComponentLink3Description: https://datasheet.ciiva.com/41460/001187859-da-01-en-ic-i-o-expander-tca6408arsvr-qfn-16-tid-41460599.pdf?src-supplier=Conrad; ComponentLink4URL: https://datasheet.ciiva.com/1780/tca6408a-1780880.pdf?src-supplier=Digikey; ComponentLink4Description: https://datasheet.ciiva.com/1780/tca6408a-1780880.pdf?src-supplier=Digikey; ComponentLink5URL: https://datasheet.ciiva.com/3149/tca6408a-3149514.pdf?src-supplier=Avnet; ComponentLink5Description: https://datasheet.ciiva.com/3149/tca6408a-3149514.pdf?src-supplier=Avnet
footprint 16-UQFN (2.6x1.8)
pins: 1 ~{RESET}, 2 P0, 3 P1, 4 P2, 5 P3, 6 GND, 7 P4, 8 P5, 9 P6, 10 P7, 11 ~{INT}, 12 SCL, 13 SDA, 14 VCCP, 15 VCCI, 16 ADDR

## TCA6424ARGJR
designator U?
IC XPNDR 400KHZ I2C SMBUS 32UQFN; Manufacturer: Texas Instruments; Manufacturer Part Number: TCA6424ARGJR; Min Supply Voltage: 1.65V; Max Supply Voltage: 5.5V; Output Current: 25mA; Number of Outputs: 24; Output Type: PUSH-PULL; Supplier: Mouser; Supplier Part Number: 595-TCA6424ARGJR; RoHS: Yes; Category: Interface ICs; Stock: 59506; Pricing: 1=2.13, 10=1.81, 50=1.81, 100=1.54, 1000=1.05, 10000=0.894 (USD); Case/Package: QFN; Pins: 32; Weight: 0.002116oz; Min Operating Temperature: -40°C; Max Operating Temperature: 85°C; Packaging: Tape and Reel; Number of I/Os: 24; Clock Frequency: 400kHz; Frequency: 400kHz; Series: -; Length: 5.15mm; Width: 5.15mm; Height: 0.6mm; Radiation Hardening: No; Reach SVHC Compliant: No; Lead Free: Lead Free; RoHS Compliant: Yes; ComponentLink1URL: https://datasheet.ciiva.com/1600/tca6424a-1600866.pdf?src-supplier=Newark; ComponentLink1Description: https://datasheet.ciiva.com/1600/tca6424a-1600866.pdf?src-supplier=Newark; ComponentLink2URL: https://datasheet.ciiva.com/1496/1535173-1496151.pdf?src-supplier=Element14; ComponentLink2Description: https://datasheet.ciiva.com/1496/1535173-1496151.pdf?src-supplier=Element14; ComponentLink3URL: https://datasheet.ciiva.com/22652/1699435-22652096.pdf?src-supplier=Element14; ComponentLink3Description: https://datasheet.ciiva.com/22652/1699435-22652096.pdf?src-supplier=Element14; ComponentLink4URL: https://datasheet.ciiva.com/1780/tca6424a-1780437.pdf?src-supplier=Digikey; ComponentLink4Description: https://datasheet.ciiva.com/1780/tca6424a-1780437.pdf?src-supplier=Digikey; ComponentLink5URL: https://datasheet.ciiva.com/4826/scps193b-101393-4826180.pdf?src-supplier=Mouser; ComponentLink5Description: https://datasheet.ciiva.com/4826/scps193b-101393-4826180.pdf?src-supplier=Mouser; ComponentLink6URL: https://datasheet.ciiva.com/15134/getdatasheetpartid-254651-15134577.pdf?src-supplier=Verical; ComponentLink6Description: https://datasheet.ciiva.com/15134/getdatasheetpartid-254651-15134577.pdf?src-supplier=Verical; ComponentLink7URL: https://datasheet.ciiva.com/1505/1535173-1505147.pdf?src-supplier=Farnell; ComponentLink7Description: https://datasheet.ciiva.com/1505/1535173-1505147.pdf?src-supplier=Farnell; ComponentLink8URL: https://datasheet.ciiva.com/1780/tca6424a-1780438.pdf?src-supplier=Digikey; ComponentLink8Description: https://datasheet.ciiva.com/1780/tca6424a-1780438.pdf?src-supplier=Digikey; ComponentLink9URL: https://datasheet.ciiva.com/1780/tca6424a-1780439.pdf?src-supplier=Digikey; ComponentLink9Description: https://datasheet.ciiva.com/1780/tca6424a-1780439.pdf?src-supplier=Digikey; ComponentLink10URL: https://datasheet.ciiva.com/14195/tca6424a-14195387.pdf?src-supplier=Avnet; ComponentLink10Description: https://datasheet.ciiva.com/14195/tca6424a-14195387.pdf?src-supplier=Avnet; ComponentLink11URL: https://datasheet.ciiva.com/41460/001187873-da-01-en-ic-i-o-expander-tca6424argjr-uqfn-32-tid-41460550.pdf?src-supplier=Conrad; ComponentLink11Description: https://datasheet.ciiva.com/41460/001187873-da-01-en-ic-i-o-expander-tca6424argjr-uqfn-32-tid-41460550.pdf?src-supplier=Conrad; LCSC Part Number: C80692; Item Type: IC
footprint 32-UQFN (5x5)
pins: 1 P00, 2 P01, 3 P02, 4 P03, 5 P04, 6 P05, 7 P06, 8 P07, 9 P10, 10 P11, 11 P12, 12 P13, 13 P14, 14 P15, 15 P16, 16 P17, 17 P20, 18 P21, 19 P22, 20 P23, 21 P24, 22 P25, 23 P26, 24 P27, 25 GND, 26 ADDR, 27 VCCP, 28 ~{RESET}, 29 SCL, 30 SDA, 31 VCCI, 32 ~{INT}, 33 EXP

## TCA9534PWR
designator U?
IC XPNDR 400KHZ I2C 16TSSOP; Manufacturer: Texas Instruments; Manufacturer Part Number: TCA9534PWR; Number of I/Os: 8; Output Type: PUSH-PULL; Max Supply Voltage: 5.5V; Min Supply Voltage: 1.65V; Supplier: Mouser; Supplier Part Number: 595-TCA9534PWR; RoHS: Yes; Category: Interface ICs; Stock: 11972; Pricing: 1=1.2, 10=0.788, 50=0.788, 100=0.654, 1000=0.606, 10000=0.564 (USD); Mounting Technology: Surface Mount; Case/Package: TSSOP; Pins: 16; Min Operating Temperature: -40°C; Max Operating Temperature: 85°C; Packaging: Cut Tape; Interface: I2C; Frequency: 400kHz; Number of Outputs: 8; Series: -; Number of Channels: 8; Length: 5mm; Width: 4.4mm; Height: 1.2mm; Thickness: 1mm; Lead Free: Lead Free; RoHS Compliant: Yes; ComponentLink1URL: https://datasheet.ciiva.com/48508/tca9534-48508117.pdf?src-supplier=Avnet; ComponentLink1Description: https://datasheet.ciiva.com/48508/tca9534-48508117.pdf?src-supplier=Avnet; LCSC Part Number: C783615; Item Type: IC
footprint TSSOP_16
pins: 1 A0, 2 A1, 3 A2, 4 P0, 5 P1, 6 P2, 7 P3, 8 GND, 9 P4, 10 P5, 11 P6, 12 P7, 13 ~{INT}, 14 SCL, 15 SDA, 16 VCC

## TCA9535PWR
designator U?
IC XPND 400KHZ I2C SMBUS 24TSSOP; Manufacturer: Texas Instruments; Manufacturer Part Number: TCA9535PWR; Supplier: Mouser; Supplier Part Number: 595-TCA9535PWR; RoHS: Yes; Category: Interface ICs; Stock: 12963; Pricing: 1=1.22, 10=0.799, 50=0.799, 100=0.663, 1000=0.615, 10000=0.557 (USD); Length: 7.8mm; Width: 4.4mm; Height: 1.2mm; Thickness: 1mm; Lead Free: 5697LeadFree; ComponentLink1URL: https://datasheet.ciiva.com/4826/scps201a-101401-4826418.pdf?src-supplier=Mouser; ComponentLink1Description: https://datasheet.ciiva.com/4826/scps201a-101401-4826418.pdf?src-supplier=Mouser; ComponentLink2URL: https://datasheet.ciiva.com/22652/scps201a-22652097.pdf?src-supplier=Element14; ComponentLink2Description: https://datasheet.ciiva.com/22652/scps201a-22652097.pdf?src-supplier=Element14; ComponentLink3URL: https://datasheet.ciiva.com/1780/tca9535-1780411.pdf?src-supplier=Digikey; ComponentLink3Description: https://datasheet.ciiva.com/1780/tca9535-1780411.pdf?src-supplier=Digikey; ComponentLink4URL: https://datasheet.ciiva.com/14195/tca9535-14195180.pdf?src-supplier=Avnet; ComponentLink4Description: https://datasheet.ciiva.com/14195/tca9535-14195180.pdf?src-supplier=Avnet; Package: TSSOP-24; LCSC Part Number: C130204; Item Type: IC
footprint 24-TSSOP
pins: 1 ~{INT}, 2 A1, 3 A2, 4 P00, 5 P01, 6 P02, 7 P03, 8 P04, 9 P05, 10 P06, 11 P07, 12 GND, 13 P10, 14 P11, 15 P12, 16 P13, 17 P14, 18 P15, 19 P16, 20 P17, 21 A0, 22 SCL, 23 SDA, 24 VCC

## TCA9536DTMR
designator U?
IC XPNDR 1MHZ I2C SMBUS 8X2SON; Manufacturer: Texas Instruments; Manufacturer Part Number: TCA9536DTMR; Supplier: Digikey; LCSC Part Number: C3190167; RoHS: No; Item Type: IC; Stock: 11208; Pricing: 1=1.47, 10=1.031, 25=0.9216, 100=0.8017, 250=0.7444, 500=0.70988, 1000=0.68143, 2500=0.65139 (USD)
footprint 8-X2SON (1.35x0.8)
pins: 1 P0, 2 P2, 3 GND, 4 P3/~{INT}, 5 SCL, 6 SDA, 7 VCC, 8 P1

## TCAN1044VDRQ1
designator U?
IC TRANSCEIVER 1/1 8SOIC; Manufacturer: Texas Instruments; Manufacturer Part Number: TCAN1044VDRQ1; Supplier: Mouser; Supplier Part Number: 595-TCAN1044VDRQ1; RoHS: Yes; Category: Interface ICs; Stock: 317; Pricing: 1=1.4, 10=1.19, 50=1.19, 100=0.912, 1000=0.636, 10000=0.554 (USD); ComponentLink1URL: http://www.ti.com/general/docs/suppproductinfo.tsp?distId=10&amp;gotoUrl=http%3A%2F%2Fwww.ti.com%2Flit%2Fgpn%2Ftcan1044-q1&src-supplier=Digikey; ComponentLink1Description: http://www.ti.com/general/docs/suppproductinfo.tsp?distId=10&amp;gotoUrl=http%3A%2F%2Fwww.ti.com%2Flit%2Fgpn%2Ftcan1044-q1&src-supplier=Digikey; LCSC Part Number: C1852061; Item Type: IC
footprint SOIC-8(0.154", 3.90mm Width)
pins: 1 TXD, 2 GND, 3 VCC, 4 RXD, 5 NC/VIO, 6 CANL, 7 CANH, 8 STB

## TCAN1463DMTRQ1
designator U?
IC TRANSCEIVER HALF 1/1 14VSON; Manufacturer: Texas Instruments; Manufacturer Part Number: TCAN1463DMTRQ1; Supplier: Mouser; Supplier Part Number: 595-TCAN1463DMTRQ1; RoHS: Yes; Item Type: IC; Stock: 20610; Pricing: 1=2.47, 10=2.22, 50=2.22, 100=1.78, 1000=1.21, 10000=1.09 (USD); LCSC Part Number: C5215823
footprint VSON-14(3x4.5)
part A pins: 2 GND, 3 VCC, 5 VIO, 10 VSUP, 15 EP
part B pins: 1 TXD, 4 RXD, 6 EN, 7 INH, 8 nFAULT, 9 WAKE, 11 INH_MASK, 12 CANL, 13 CANH, 14 nSTB

## TCAN3414DR
designator U?
IC TRANSCEIVER HALF 1/1 8SOIC; Manufacturer: Texas Instruments; Manufacturer Part Number: TCAN3414DR; Supplier: Mouser; LCSC Part Number: C22396693; RoHS: No; Item Type: IC; Stock: 201; Pricing: 1=1.55, 10=1.1, 50=1.1, 100=0.895, 1000=0.763, 10000=0.681 (USD); Case/Package: SOIC; Pins: 8; Length: 4.9mm; Width: 3.91mm; Height: 1.75mm; Thickness: 1.58mm
footprint SOIC-8(0.154", 3.90mm Width)
pins: 1 TXD, 2 GND, 3 VCC, 4 RXD, 5 SHDN/VIO, 6 CANL, 7 CANH, 8 STB

## THVD1449DR
designator U?
IC TRANSCEIVER HALF 1/1 8SOIC; Manufacturer: Texas Instruments; Manufacturer Part Number: THVD1449DR; Supplier: Mouser; LCSC Part Number: C3235059; RoHS: No; Item Type: IC; Stock: 7454; Pricing: 1=3.62, 10=2.51, 50=2.51, 100=2.27, 1000=2.02, 10000=1.95 (USD)
footprint SOIC-8(0.154", 3.90mm Width)
pins: 1 R, 2 RE#, 3 DE, 4 D, 5 GND, 6 A, 7 B, 8 VCC

## THVD2450DRBR
designator U?
IC TRANSCEIVER HALF 1/1 8SON; Manufacturer: Texas Instruments; Manufacturer Part Number: THVD2450DRBR; Supplier: Digikey; Supplier Part Number: 296-THVD2450DRBRCT-ND; RoHS: Yes; Item Type: IC; Stock: 2652; Pricing: 1=4.05, 10=3.639, 25=3.4404, 100=2.9818, 250=2.82892, 500=2.53838, 1000=2.1408 (USD); Pins: 8NUMBER; Length: 3mm; Width: 3mm; Height: 1mm; Thickness: 880um; LCSC Part Number: C2878080
footprint SON-8-EP(3x3)
pins: 1 R, 2 RE#, 3 DE, 4 D, 5 GND, 6 A, 7 B, 8 VCC, 9 EP

## TJA1050T/CM,118
designator U?
IC TRANSCEIVER HALF 1/1 8SO; Manufacturer: NXP Semiconductors; Manufacturer Part Number: TJA1050T/CM,118; Supplier: Digikey; LCSC Part Number: C6952; RoHS: Yes; Item Type: IC; Stock: 26815; Pricing: 1=1.89, 10=1.702, 25=1.606, 100=1.3682, 250=1.28472, 500=1.12412, 1000=0.93142 (USD); Height: 1.75mm; ComponentLink1URL: https://datasheet.ciiva.com/26933/getdatasheetpartid-747091-26933446.pdf?src-supplier=Verical; ComponentLink1Description: https://datasheet.ciiva.com/26933/getdatasheetpartid-747091-26933446.pdf?src-supplier=Verical; ComponentLink2URL: https://datasheet.ciiva.com/24191/tja1050-24191228.pdf?src-supplier=Future+Electronics; ComponentLink2Description: https://datasheet.ciiva.com/24191/tja1050-24191228.pdf?src-supplier=Future+Electronics; ComponentLink3URL: https://datasheet.ciiva.com/18624/tja1050-18624869.pdf?src-supplier=Digikey; ComponentLink3Description: https://datasheet.ciiva.com/18624/tja1050-18624869.pdf?src-supplier=Digikey; ComponentLink4URL: https://datasheet.ciiva.com/29891/tja1050-29891527.pdf?src-supplier=Avnet; ComponentLink4Description: https://datasheet.ciiva.com/29891/tja1050-29891527.pdf?src-supplier=Avnet
footprint SOP-8
pins: 1 TXD, 2 GND, 3 VCC, 4 RXD, 5 VREF, 6 CANL, 7 CANH, 8 S

## TL331IDBVR
designator U?
IC COMPARATOR 1 DIFF SOT23-5; Manufacturer: Texas Instruments; Manufacturer Part Number: TL331IDBVR; Supplier: Mouser; LCSC Part Number: C80942; RoHS: Yes; Item Type: IC; Stock: 106032; Pricing: 1=0.5, 10=0.396, 50=0.396, 100=0.295, 1000=0.207, 10000=0.152 (USD); ComponentLink1URL: https://datasheet.ciiva.com/1483/1771402-1483765.pdf?src-supplier=Element14; ComponentLink1Description: https://datasheet.ciiva.com/1483/1771402-1483765.pdf?src-supplier=Element14; ComponentLink2URL: https://datasheet.ciiva.com/1827/tl331-1827297.pdf?src-supplier=Digikey; ComponentLink2Description: https://datasheet.ciiva.com/1827/tl331-1827297.pdf?src-supplier=Digikey; ComponentLink3URL: https://datasheet.ciiva.com/1827/tl331-1827298.pdf?src-supplier=Digikey; ComponentLink3Description: https://datasheet.ciiva.com/1827/tl331-1827298.pdf?src-supplier=Digikey; ComponentLink4URL: https://datasheet.ciiva.com/1827/tl331-1827299.pdf?src-supplier=Digikey; ComponentLink4Description: https://datasheet.ciiva.com/1827/tl331-1827299.pdf?src-supplier=Digikey; ComponentLink5URL: https://datasheet.ciiva.com/2970/tl331-2970638.pdf?src-supplier=Avnet; ComponentLink5Description: https://datasheet.ciiva.com/2970/tl331-2970638.pdf?src-supplier=Avnet; ComponentLink6URL: https://datasheet.ciiva.com/2970/tl331-2970639.pdf?src-supplier=Avnet; ComponentLink6Description: https://datasheet.ciiva.com/2970/tl331-2970639.pdf?src-supplier=Avnet; ComponentLink7URL: https://datasheet.ciiva.com/46384/1887693-46384373.pdf?src-supplier=Element14; ComponentLink7Description: https://datasheet.ciiva.com/46384/1887693-46384373.pdf?src-supplier=Element14; ComponentLink8URL: https://datasheet.ciiva.com/46384/1887693-46384376.pdf?src-supplier=Element14; ComponentLink8Description: https://datasheet.ciiva.com/46384/1887693-46384376.pdf?src-supplier=Element14
footprint SOT-23-5
pins: 1 IN-, 2 VCC-/GND, 3 IN+, 4 OUT, 5 VCC

## TL431ACDBZR
designator U?
IC VREF SHUNT ADJ 1% SOT23-3; Manufacturer: Texas Instruments; Manufacturer Part Number: TL431ACDBZR; Output Current: 100mA; Temperature Coefficient: 34ppm/°C; Cathode Current: 600uA; Reference Type: Shunt,Adjustable; Output Voltage: 36V; Max Supply Voltage: 37V; Min Output Voltage: 2.495V; Output Type: Adjustable; Supplier: Mouser; LCSC Part Number: C350683; RoHS: Yes; Item Type: IC; Stock: 33202; Pricing: 1=0.42, 10=0.283, 50=0.283, 100=0.134, 1000=0.103, 10000=0.079 (USD); Case/Package: SOT-23; Pins: 3; Min Operating Temperature: -40°C; Max Operating Temperature: 125°C; Packaging: Tape and Reel; Package Quantity: 3000; Tolerance: 1%; Series: -; Max Output current: 100mA; Reference Voltage: 36V; Max Output Voltage: 36V; Min Input Voltage: 2.495V; Termination: SMD/SMT; Thickness: 1mm; Radiation Hardening: No; Lead Free: Lead Free; RoHS Compliant: Yes; Reach SVHC Compliant: No; ComponentLink1URL: https://datasheet.ciiva.com/15149/getdatasheetpartid-184457-15149018.pdf?src-supplier=Verical; ComponentLink1Description: https://datasheet.ciiva.com/15149/getdatasheetpartid-184457-15149018.pdf?src-supplier=Verical; ComponentLink2URL: https://datasheet.ciiva.com/2006/tl431a-2006221.pdf?src-supplier=Digikey; ComponentLink2Description: https://datasheet.ciiva.com/2006/tl431a-2006221.pdf?src-supplier=Digikey; ComponentLink3URL: https://datasheet.ciiva.com/2006/tl431a-2006220.pdf?src-supplier=Digikey; ComponentLink3Description: https://datasheet.ciiva.com/2006/tl431a-2006220.pdf?src-supplier=Digikey; ComponentLink4URL: https://datasheet.ciiva.com/2006/tl431a-2006222.pdf?src-supplier=Digikey; ComponentLink4Description: https://datasheet.ciiva.com/2006/tl431a-2006222.pdf?src-supplier=Digikey; ComponentLink5URL: https://datasheet.ciiva.com/3235/tl432b-3235591.pdf?src-supplier=Avnet; ComponentLink5Description: https://datasheet.ciiva.com/3235/tl432b-3235591.pdf?src-supplier=Avnet
footprint SOT-23 (TRANS NPN 40V 0.6A SOT23)
pins: 1 Cathode, 2 REF, 3 Anode

## TL431AIDBZR
designator U?
IC VREF SHUNT ADJ 1% SOT23-3; Manufacturer: Texas Instruments; Manufacturer Part Number: TL431AIDBZR; Output Voltage: 36V; Number of Channels: 1; Cathode Current: 700uA; Output Current: 100mA; Reference Type: Shunt,Adjustable; Min Input Voltage: 2.495V; Max Supply Voltage: 37V; Temperature Coefficient: 92ppm/°C; Output Type: Adjustable; Supplier: Mouser; LCSC Part Number: C23892; RoHS: Yes; Item Type: IC; Stock: 732677; Pricing: 1=0.25, 10=0.142, 50=0.142, 100=0.099, 1000=0.095, 10000=0.08 (USD); Case/Package: SOT-23; Pins: 3; Min Operating Temperature: -40°C; Max Operating Temperature: 125°C; Packaging: Tape and Reel; Package Quantity: 1; Tolerance: 1%; Reference Voltage: 36V; Series: -; Max Output current: 100mA; Min Output Voltage: 2.495V; Max Output Voltage: 36V; Radiation Hardening: No; Lead Free: Lead Free; RoHS Compliant: Yes; Reach SVHC Compliant: No; ComponentLink1URL: https://datasheet.ciiva.com/3235/tl432b-3235600.pdf?src-supplier=Avnet; ComponentLink1Description: https://datasheet.ciiva.com/3235/tl432b-3235600.pdf?src-supplier=Avnet; ComponentLink2URL: https://datasheet.ciiva.com/15148/getdatasheetpartid-171576-15148968.pdf?src-supplier=Verical; ComponentLink2Description: https://datasheet.ciiva.com/15148/getdatasheetpartid-171576-15148968.pdf?src-supplier=Verical; ComponentLink3URL: https://datasheet.ciiva.com/41462/001014548-da-01-en-ic-vref-shunt-prec-tl431aidbzr-sot-3-tid-41462400.pdf?src-supplier=Conrad; ComponentLink3Description: https://datasheet.ciiva.com/41462/001014548-da-01-en-ic-vref-shunt-prec-tl431aidbzr-sot-3-tid-41462400.pdf?src-supplier=Conrad; ComponentLink4URL: https://datasheet.ciiva.com/46397/1887475-46397705.pdf?src-supplier=Element14; ComponentLink4Description: https://datasheet.ciiva.com/46397/1887475-46397705.pdf?src-supplier=Element14; ComponentLink5URL: https://datasheet.ciiva.com/2006/tl431a-2006188.pdf?src-supplier=Digikey; ComponentLink5Description: https://datasheet.ciiva.com/2006/tl431a-2006188.pdf?src-supplier=Digikey; ComponentLink6URL: https://datasheet.ciiva.com/2006/tl431a-2006187.pdf?src-supplier=Digikey; ComponentLink6Description: https://datasheet.ciiva.com/2006/tl431a-2006187.pdf?src-supplier=Digikey; ComponentLink7URL: https://datasheet.ciiva.com/2006/tl431a-2006189.pdf?src-supplier=Digikey; ComponentLink7Description: https://datasheet.ciiva.com/2006/tl431a-2006189.pdf?src-supplier=Digikey
footprint SOT-23 (TRANS NPN 40V 0.6A SOT23)
pins: 1 Cathode, 2 REF, 3 Anode

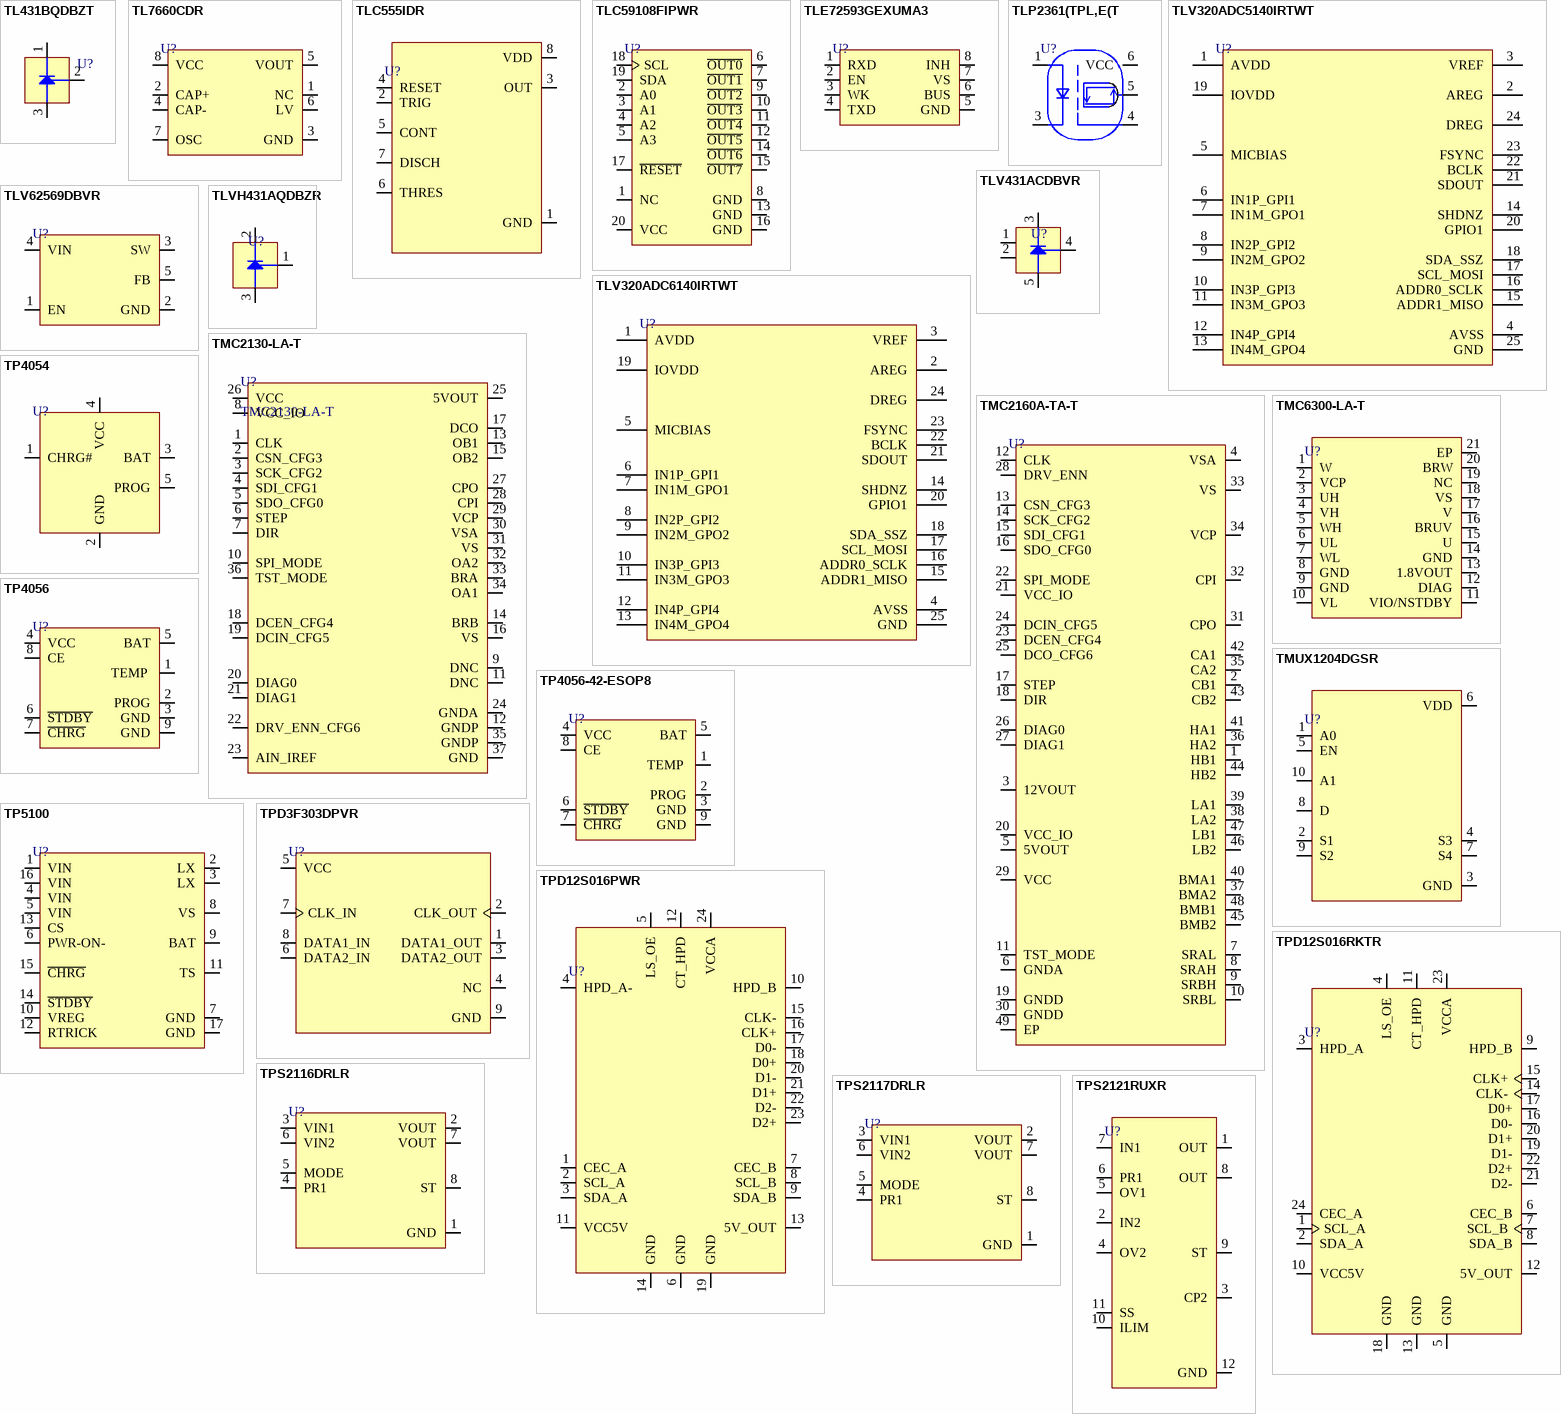
[diagram p19: symbols TL431BQDBZT to TPS2121RUXR]